# EAGLE library part PA2002NL (library madhu)
Pulse Electronics High Isolation Transformer
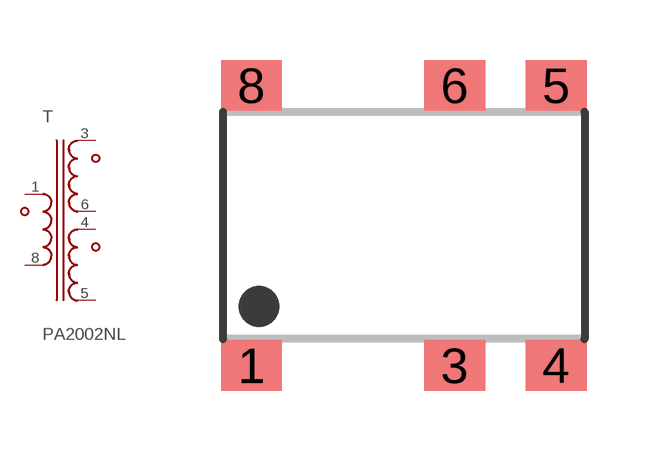
[diagram p36: symbol with the pads of PA2002NL; footprint PA2002NL]

Designator prefix T

## PA2002NL  [PA2002NL]
1  PA  pas
3  S1A  pas
4  S2A  pas
5  S2B  pas
6  S1B  pas
8  PB  pas

## PA2002NLT  [PA2002NL]
Pads as for PA2002NL

## Footprint PA2002NL (pad centres in mm)
Pulse Electronics High Isolation Transformer PA200xNL three winding transformer
smd 1.524 x 1.27: 1 -3.81,-3.505; 3 1.27,-3.505; 4 3.81,-3.505; 5 3.81,3.505; 6 1.27,3.505; 8 -3.81,3.505